# Altium footprint library TRIM_3296Y-1-104LF.PcbLib: 1 footprints
Each footprint in its own frame and in the unit in brackets; x right, y up, seen from the top. Pads: shape width x height; smd on the part's side, far side on the other; paste and mask are expansions set on the pad; w line width, h text height; cw(c..) or ccw(c..) is an arc to the next point about the centre after c.
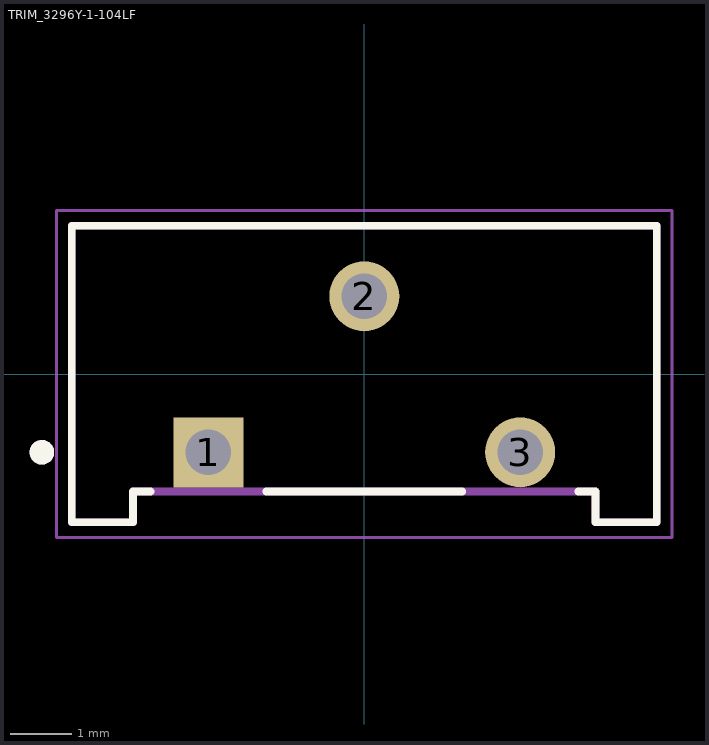
[diagram p0: the footprint, top view; thin cyan lines are the x and y axes]

## TRIM_3296Y-1-104LF [mm]
height 11.8
pads (3):
  rect 1.14x1.14 / inner round 1.14 / far side rect 1.14x1.14 hole 0.74: 1(-2.54,-1.27)
  round 1.14 hole 0.74: 2(0,1.27) 3(2.54,-1.27)
Top Overlay:
  circle w0.2: c-5.25,-1.27 r0.1
  lines w0.127: -3.484,-1.91 -3.765,-1.91 -3.765,-2.41 -4.765,-2.41 -4.765,2.42 4.765,2.42 4.765,-2.41 3.765,-2.41 3.765,-1.91 3.484,-1.91 ; -1.596,-1.91 1.596,-1.91
Mechanical 13:
  circle w0.2: c-5.25,-1.27 r0.1
  lines w0.127: -4.765,-2.41 -4.765,2.42 4.765,2.42 4.765,-2.41 3.765,-2.41 3.765,-1.91 -3.765,-1.91 -3.765,-2.41 -4.765,-2.41
Mechanical 15:
  lines w0.05: -5.015,-2.66 5.015,-2.66 5.015,2.67 -5.015,2.67 -5.015,-2.66
3D body "step_temp.STEP": height 11.55, standoff -7.72, extent -4.704,-2.415 4.826,2.415